# Altium footprint library 4.7µH电感_SRN6045TA-4R7M.PcbLib: 1 footprints
Each footprint in its own frame and in the unit in brackets; x right, y up, seen from the top. Pads: shape width x height; smd on the part's side, far side on the other; paste and mask are expansions set on the pad; w line width, h text height; cw(c..) or ccw(c..) is an arc to the next point about the centre after c.
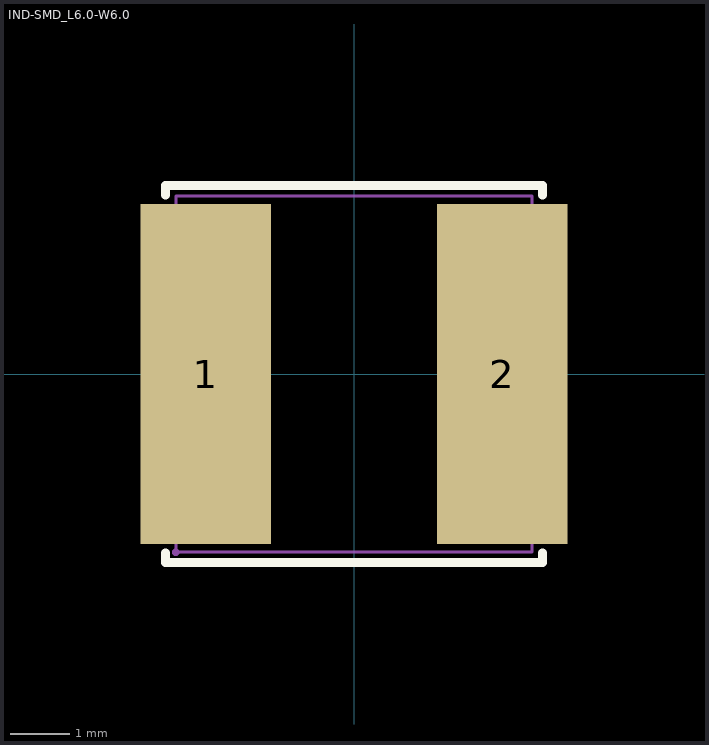
[diagram p0: the footprint, top view; thin cyan lines are the x and y axes]

## IND-SMD_L6.0-W6.0 [mm]
pads (2):
  rect 2.2x5.72 smd: 1(-2.5,0) 2(2.5,0)
Top Overlay:
  lines w0.152: -3.176,-3.012 -3.176,-3.176 3.176,-3.176 3.176,-3.012 ; -3.176,3.012 -3.176,3.176 3.176,3.176 3.176,3.012
Mechanical 6:
  lines w0.051: -3,-3 3,-3 3,3 -3,3 -3,-3
Mechanical 8:
  region: -2.94,-3 -2.94,-3.025 -2.975,-3.06 -3.025,-3.06 -3.06,-3.025 -3.06,-3 -3.06,-2.975 -3.025,-2.94 -2.975,-2.94 -2.94,-2.975 -2.94,-3
Mechanical 9:
  region: -1.45,-2.45 -3,-2.45 -3,2.45 -1.45,2.45
  region: 1.45,2.45 3,2.45 3,-2.45 1.45,-2.45